# Altium footprint library CoilcraftPCB.PcbLib: 320 footprints (part 1 of 20)
Each footprint in its own frame and in the unit in brackets; x right, y up, seen from the top. Pads: shape width x height; smd on the part's side, far side on the other; paste and mask are expansions set on the pad; w line width, h text height; cw(c..) or ccw(c..) is an arc to the next point about the centre after c.
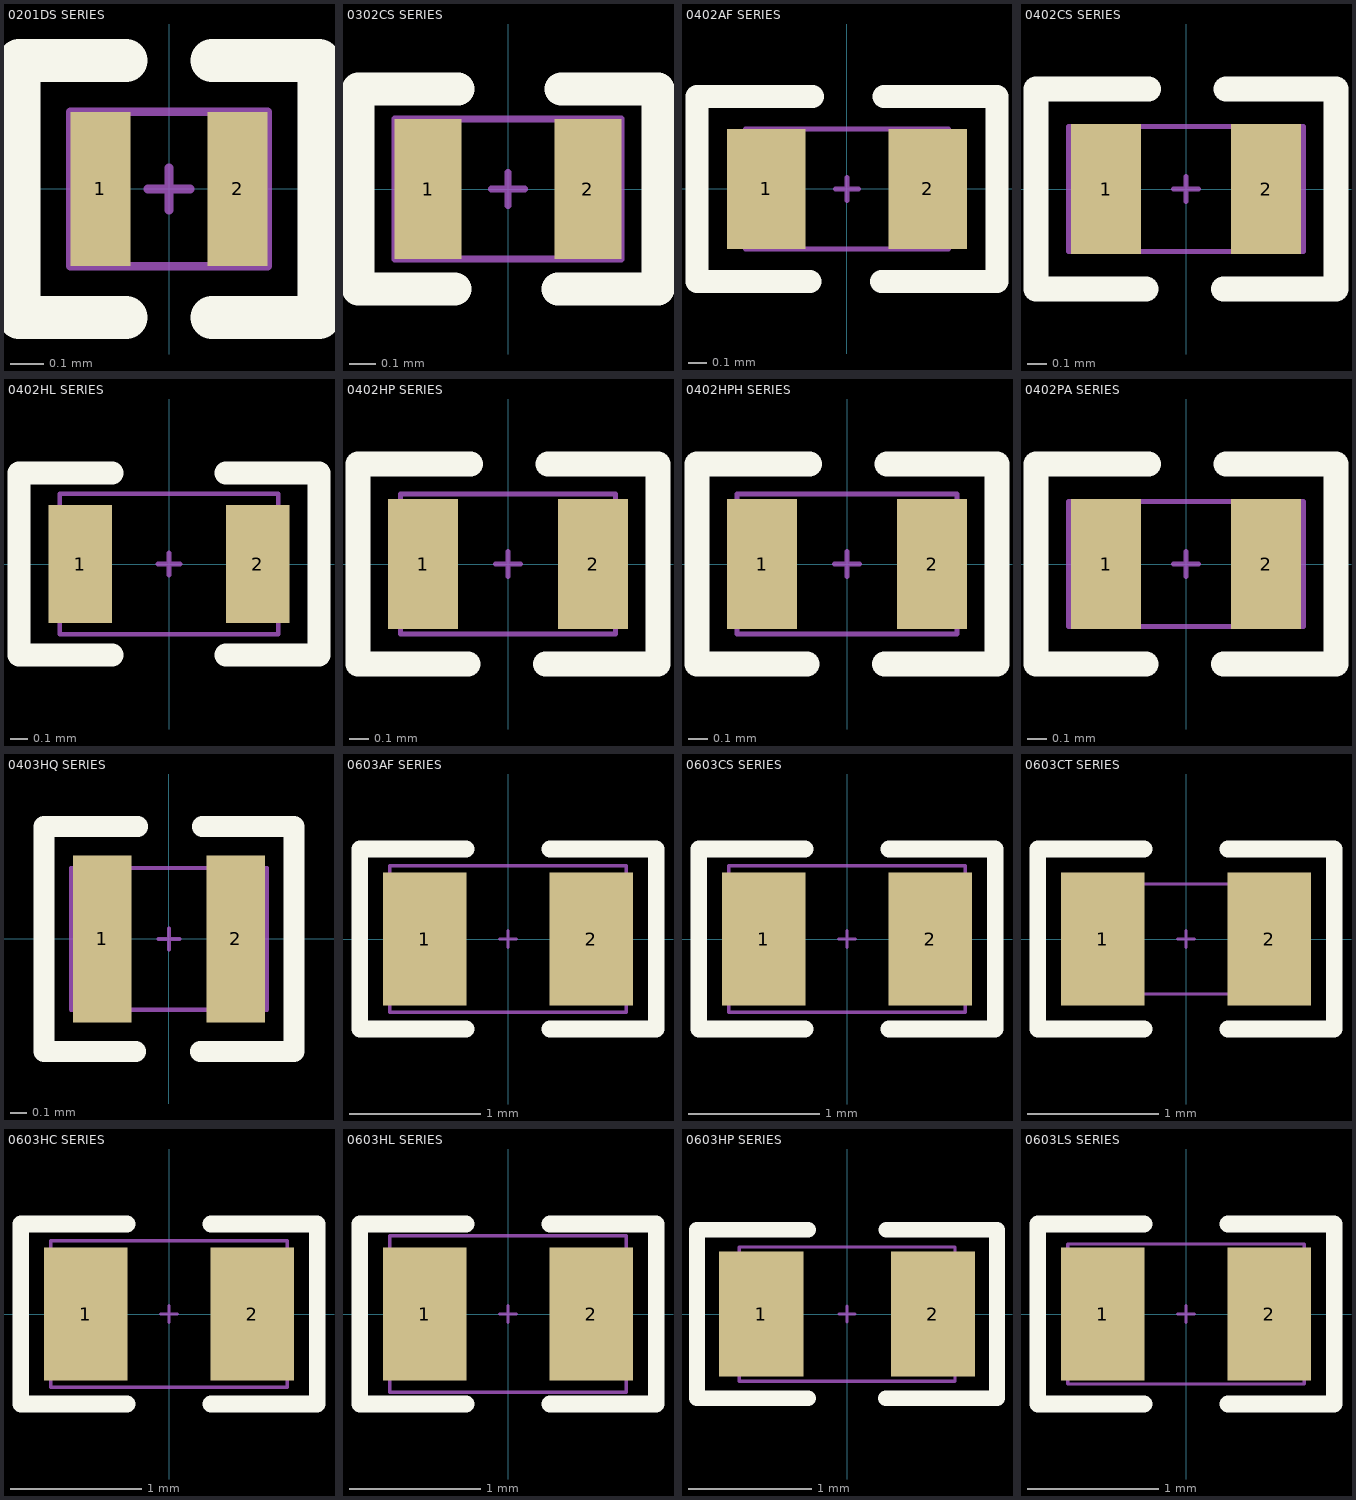
[diagram p0: the footprints below, top view; thin cyan lines are the x and y axes]

## 0201DS SERIES [mil] "Coilcraft Chip Inductor"
height 17.7
pads (2):
  rect 7x18 smd: 1(-8,0) 2(8,0)
Top Overlay:
  lines w5: -5,-15 -17.5,-15 -17.5,15 -5,15 ; 4.99,-15.01 17.49,-15.01 17.49,14.99 4.99,14.99
Mechanical 13:
  lines w1: -2.51,0 2.49,0 ; 0,-2.5 0,2.5
Mechanical 14:
  lines w1: -11.5,-9 11.5,-9 11.5,9 -11.5,9 -11.5,-9
3D body: height 17.81, standoff -0.42, extent -11.5,-9 11.57,9.19

## 0302CS SERIES [mil] "Coilcraft Chip Inductor"
height 18
pads (2):
  rect 10x21 smd: 1(-12,0) 2(12,0)
Top Overlay:
  lines w5: -8,-15 -22.5,-15 -22.5,15 -7.5,15 ; 7.5,-15 22.5,-15 22.5,15 8,15
Mechanical 13:
  lines w1: -2.5,0 2.5,0 ; 0,-2.5 0,2.5
Mechanical 14:
  lines w1: -17,-10.5 -17,10.5 17,10.5 17,-10.5 -17,-10.5
3D body: height 17.46, standoff -0.42, extent -16.85,-12.79 16.85,12.8

## 0402AF SERIES [mil] "Coilcraft Chip Inductor"
height 26
pads (2):
  rect 17x26 smd: 1(-17.5,0) 2(17.5,0)
Top Overlay:
  lines w5: -8,-20 -32.5,-20 -32.5,20 -7.5,20 ; 7.5,-20 32.5,-20 32.5,20 8,20
Mechanical 13:
  lines w1: -2.5,0 2.5,0 ; 0,-2.5 0,2.5
Mechanical 14:
  lines w1: -22,-13 22,-13 22,13 -22,13 -22,-13
3D body: height 25.63, standoff -0.39, extent -22.05,-10.08 22.04,10.08

## 0402CS SERIES [mil] "Coilcraft Chip Inductor"
height 26
pads (2):
  rect 14x26 smd: 1(-16,0) 2(16,0)
Top Overlay:
  lines w5: -8,-20 -30,-20 -30,20 -7.5,20 ; 7.5,-20 30,-20 30,20 8,20
Mechanical 13:
  lines w1: -2.5,0 2.5,0 ; 0,-2.5 0,2.5
Mechanical 14:
  lines w1: -23.5,-12.5 -23.5,12.5 23.5,12.5 23.5,-12.5 -23.5,-12.5
3D body: height 25.59, standoff -0.39, extent -23.35,-12.52 23.34,12.52

## 0402HL SERIES [mil] "Coilcraft Chip Inductor"
height 22
pads (2):
  rect 14x26 smd: 1(-19.5,0) 2(19.5,0)
Top Overlay:
  lines w5: -12.5,-20 -33,-20 -33,20 -12.5,20 ; 12.5,-20 33,-20 33,20 12.5,20
Mechanical 13:
  lines w1: -2.5,0 2.5,0 ; 0,-2.5 0,2.5
Mechanical 14:
  lines w1: -24,-15.5 -24,15.5 24,15.5 24,-15.5 -24,-15.5
3D body: height 21.68, standoff -0.37, extent -24.01,-15.55 24.02,15.56

## 0402HP SERIES [mil] "Coilcraft Chip Inductor"
height 24
pads (2):
  rect 14x26 smd: 1(-17,0) 2(17,0)
Top Overlay:
  lines w5: -8,-20 -30,-20 -30,20 -7.5,20 ; 7.5,-20 30,-20 30,20 8,20
Mechanical 13:
  lines w1: -2.5,0 2.5,0 ; 0,-2.5 0,2.5
Mechanical 14:
  lines w1: -21.5,-14 -21.5,14 21.5,14 21.5,-14 -21.5,-14
3D body: height 23.54, standoff -0.39, extent -21.58,-13.99 21.57,14

## 0402HPH SERIES [mil] "Coilcraft Chip Inductor"
height 26
pads (2):
  rect 14x26 smd: 1(-17,0) 2(17,0)
Top Overlay:
  lines w5: -8,-20 -30,-20 -30,20 -7.5,20 ; 7.5,-20 30,-20 30,20 8,20
Mechanical 13:
  lines w1: -2.5,0 2.5,0 ; 0,-2.5 0,2.5
Mechanical 14:
  lines w1: -22,-14 -22,14 22,14 22,-14 -22,-14
3D body: height 25.51, standoff -0.39, extent -22.01,-13.99 22,14

## 0402PA SERIES [mil] "Coilcraft Chip Inductor"
height 26
pads (2):
  rect 14x26 smd: 1(-16,0) 2(16,0)
Top Overlay:
  lines w5: -8,-20 -30,-20 -30,20 -7.5,20 ; 7.5,-20 30,-20 30,20 8,20
Mechanical 13:
  lines w1: -2.5,0 2.5,0 ; 0,-2.5 0,2.5
Mechanical 14:
  lines w1: -23.5,-12.5 23.5,-12.5 23.5,12.5 -23.5,12.5 -23.5,-12.5
3D body: height 25.59, standoff -0.39, extent -23.35,-12.52 23.34,12.52

## 0403HQ SERIES [mil] "Coilcraft Chip Inductor"
height 26
pads (2):
  rect 14x40 smd: 1(-16,0) 2(16,0)
Top Overlay:
  lines w5: -8,-27 -30,-27 -30,27 -7.5,27 ; 7.5,-27 30,-27 30,27 8,27
Mechanical 13:
  lines w1: -2.5,0 2.5,0 ; 0,-2.5 0,2.5
Mechanical 14:
  lines w1: -23.5,-17 -23.5,17 23.5,17 23.5,-17 -23.5,-17
3D body: height 26.14, standoff -0.39, extent -20.4,-15 20.39,15

## 0603AF SERIES [mil] "Coilcraft Chip Inductor"
height 36
pads (2):
  rect 25x40 smd: 1(-25,0) 2(25,0)
Top Overlay:
  lines w5: -12.5,-27 -44.5,-27 -44.5,27 -12.5,27 ; 12.5,-27 44.5,-27 44.5,27 12.5,27
Mechanical 13:
  lines w1: -2.5,0 2.5,0 ; 0,-2.5 0,2.5
Mechanical 14:
  lines w1: -35.5,-22 -35.5,22 35.5,22 35.5,-22 -35.5,-22
3D body: height 35.43, standoff -0.39, extent -36.22,-22.04 36.22,22.05

## 0603CS SERIES [mil] "Coilcraft Chip Inductor"
height 40
pads (2):
  rect 25x40 smd: 1(-25,0) 2(25,0)
Top Overlay:
  lines w5: -12.5,-27 -44.5,-27 -44.5,27 -12.5,27 ; 12.5,-27 44.5,-27 44.5,27 12.5,27
Mechanical 13:
  lines w1: -2.5,0 2.5,0 ; 0,-2.5 0,2.5
Mechanical 14:
  lines w1: -35.5,-22 -35.5,22 35.5,22 35.5,-22 -35.5,-22
3D body: height 39.76, standoff -0.94, extent -35.51,-22.08 35.51,22.09

## 0603CT SERIES [mil] "Coilcraft Chip Inductor"
height 24
pads (2):
  rect 25x40 smd: 1(-25,0) 2(25,0)
Top Overlay:
  lines w5: -12.5,-27 -44.5,-27 -44.5,27 -12.5,27 ; 12.5,-27 44.5,-27 44.5,27 12.5,27
Mechanical 13:
  lines w1: -2.5,0 2.5,0 ; 0,-2.5 0,2.5
Mechanical 14:
  lines w1: -32,-16.5 32,-16.5 32,16.5 -32,16.5 -32,-16.5
3D body: height 20.55, standoff -0.39, extent -30.4,-15 30.39,15

## 0603HC SERIES [mil] "Coilcraft Chip Inductor"
height 40
pads (2):
  rect 25x40 smd: 1(-25,0) 2(25,0)
Top Overlay:
  lines w5: -12.5,-27 -44.5,-27 -44.5,27 -12.5,27 ; 12.5,-27 44.5,-27 44.5,27 12.5,27
Mechanical 13:
  lines w1: -2.5,0 2.5,0 ; 0,-2.5 0,2.5
Mechanical 14:
  lines w1: -35.5,-22 -35.5,22 35.5,22 35.5,-22 -35.5,-22
3D body: height 39.76, standoff -0.94, extent -35.51,-22.08 35.51,22.09

## 0603HL SERIES [mil] "Coilcraft Chip Inductor"
height 37
pads (2):
  rect 25x40 smd: 1(-25,0) 2(25,0)
Top Overlay:
  lines w5: -12.5,-27 -44.5,-27 -44.5,27 -12.5,27 ; 12.5,-27 44.5,-27 44.5,27 12.5,27
Mechanical 13:
  lines w1: -2.5,0 2.5,0 ; 0,-2.5 0,2.5
Mechanical 14:
  lines w1: -35.5,-23.5 35.5,-23.5 35.5,23.5 -35.5,23.5 -35.5,-23.5
3D body: height 36.22, standoff -0.79, extent -34.49,-21.54 34.5,21.54

## 0603HP SERIES [mil] "Coilcraft Chip Inductor"
height 37
pads (2):
  rect 27x40 smd: 1(-27.5,0) 2(27.5,0)
Top Overlay:
  lines w5: -12.5,-27 -48,-27 -48,27 -12.5,27 ; 12.5,-27 48,-27 48,27 12.5,27
Mechanical 13:
  lines w1: -2.5,0 2.5,0 ; 0,-2.5 0,2.5
Mechanical 14:
  lines w1: -34.5,-21.5 -34.5,21.5 34.5,21.5 34.5,-21.5 -34.5,-21.5
3D body: height 36.61, standoff -0.39, extent -34.45,-21.45 34.44,21.46

## 0603LS SERIES [mil] "Coilcraft Chip Inductor"
height 44
pads (2):
  rect 25x40 smd: 1(-25,0) 2(25,0)
Top Overlay:
  lines w5: -12.5,-27 -44.5,-27 -44.5,27 -12.5,27 ; 12.5,-27 44.5,-27 44.5,27 12.5,27
Mechanical 13:
  lines w1: -2.5,0 2.5,0 ; 0,-2.5 0,2.5
Mechanical 14:
  lines w1: -35.5,-21 -35.5,21 35.5,21 35.5,-21 -35.5,-21
3D body: height 43.86, standoff -0.39, extent -35.48,-23.01 35.47,23.01